# EAGLE library part BQ76922RSNR (library BQ76922RSNR)
Battery Management Three-series to five-series cell lithium-ion and lithium-phosphate battery monitor Source: Datasheet <https://www.ti.com/lit/ds/symlink/bq76922.pdf>
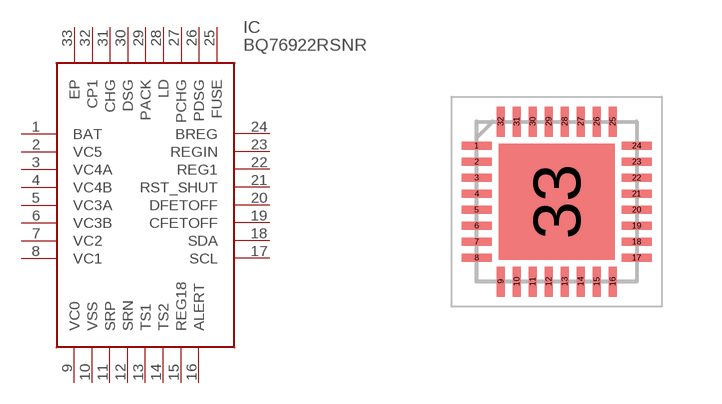
[diagram p0: symbol with the pads of QFN40P400X400X80-33N; footprint QFN40P400X400X80-33N]

Designator prefix IC

## BQ76922RSNR (Description: Battery Management Three-series to five-series cell lithium-ion and lithium-phosphate battery monitor; Height: 0.8mm; Manufacturer_Name: Texas Instruments; Manufacturer_Part_Number: BQ76922RSNR)  [QFN40P400X400X80-33N]
1  BAT
2  VC5
3  VC4A
4  VC4B
5  VC3A
6  VC3B
7  VC2
8  VC1
9  VC0
10  VSS
11  SRP
12  SRN
13  TS1
14  TS2
15  REG18
16  ALERT
17  SCL
18  SDA
19  CFETOFF
20  DFETOFF
21  RST_SHUT
22  REG1
23  REGIN
24  BREG
25  FUSE
26  PDSG
27  PCHG
28  LD
29  PACK
30  DSG
31  CHG
32  CP1
33  EP

## Footprint QFN40P400X400X80-33N (pad centres in mm)
RSN (S-PWQFN-N32)-1
smd 0.75 x 0.2: 1 -2,1.4; 2 -2,1; 3 -2,0.6; 4 -2,0.2; 5 -2,-0.2; 6 -2,-0.6; 7 -2,-1; 8 -2,-1.4; 17 2,-1.4; 18 2,-1; 19 2,-0.6; 20 2,-0.2; 21 2,0.2; 22 2,0.6; 23 2,1; 24 2,1.4
smd 0.2 x 0.75: 9 -1.4,-2; 10 -1,-2; 11 -0.6,-2; 12 -0.2,-2; 13 0.2,-2; 14 0.6,-2; 15 1,-2; 16 1.4,-2; 25 1.4,2; 26 1,2; 27 0.6,2; 28 0.2,2; 29 -0.2,2; 30 -0.6,2; 31 -1,2; 32 -1.4,2
smd 2.9 x 2.9: 33 0,0